# EAGLE library part P1410 (library madhu)
Precision Inc. 1410 Ferrite transformer
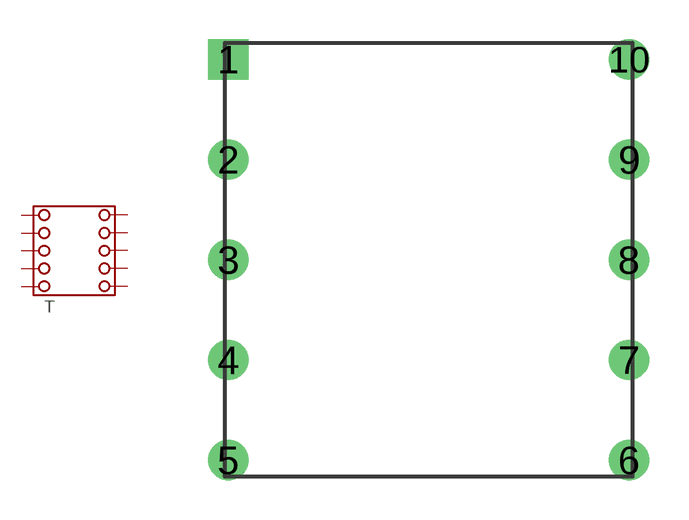
[diagram p41: symbol with the pads of P1410; footprint P1410]

Designator prefix T

## P1410  [P1410]
1  1
2  2
3  3
4  4
5  5
6  6
7  7
8  8
9  9
10  10

## Footprint P1410 (pad centres in mm)
Precision Inc. 1410 Ferrite transformer
drill 1.016 square: 1 -7.62,7.62
drill 1.016: 2 -7.62,3.81; 3 -7.62,0; 4 -7.62,-3.81; 5 -7.62,-7.62; 6 7.62,-7.62; 7 7.62,-3.81; 8 7.62,0; 9 7.62,3.81; 10 7.62,7.62